# Altium footprint library Capasitor.PcbLib: 20 footprints (part 2 of 2)
Each footprint in its own frame and in the unit in brackets; x right, y up, seen from the top. Pads: shape width x height; smd on the part's side, far side on the other; paste and mask are expansions set on the pad; w line width, h text height; cw(c..) or ccw(c..) is an arc to the next point about the centre after c.
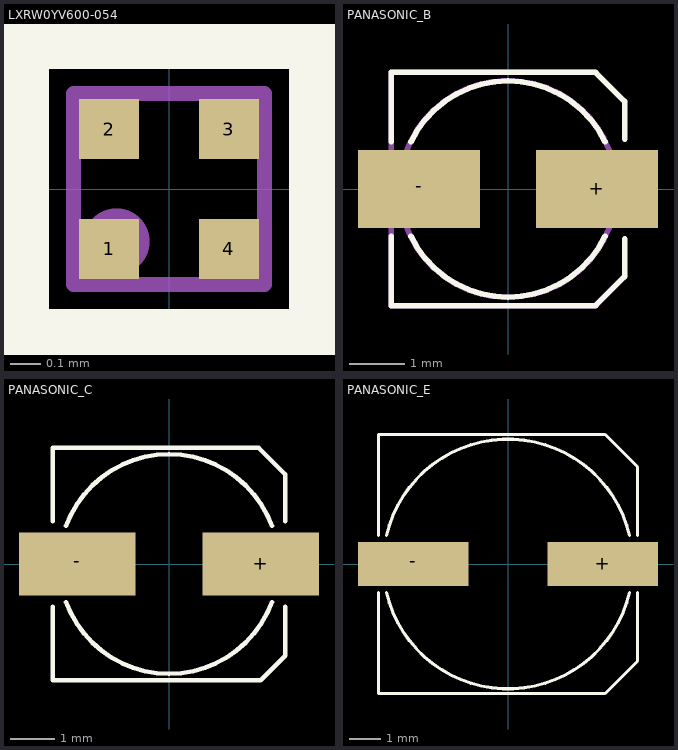
[diagram p1: the footprints below, top view; thin cyan lines are the x and y axes]

## LXRW0YV600-054 [mm]
pads (4):
  rect 0.2x0.2 smd: 1(-0.2,-0.2) 2(-0.2,0.2) 3(0.2,0.2) 4(0.2,-0.2)
Top Overlay:
  lines w0.2: -0.5,-0.5 0.5,-0.5 0.5,0.5 -0.5,0.5 -0.5,-0.5
Top Assembly:
  circle w0.2: c-0.175,-0.175 r0.01
  lines w0.05: -0.318,-0.318 0.318,-0.318 0.318,0.318 -0.318,0.318 -0.318,-0.318
  text ".Designator" at -0.5,0.117 h0.1
3D body "LXRW0_MUR.step": height 0.31, standoff 0, extent -0.318,-0.318 0.318,0.318

## PANASONIC_B [mm]
pads (2):
  rect 2.2x1.4 smd: +(1.6,0) -(-1.6,0)
Top Overlay:
  lines w0.1: 2.1,-1.575 2.1,-0.9 ; 2.1,1.575 2.1,0.9 ; 2.1,-0.9 2.1,-0.9 ; 2.1,0.9 2.1,0.9
  lines w0.102: -2.1,-0.85 -2.1,-2.1 1.575,-2.1 2.1,-1.575 ; -2.1,0.85 -2.1,2.1 1.575,2.1 2.1,1.575 ; -1.75,-0.85 ccw(c0,0) 1.75,-0.85 ; -1.75,0.85 cw(c0,0) 1.75,0.85
Mechanical 3:
  circle w0.102: c0,0 r1.95
  region: -2.3,-0.35 -2.3,0.35 -1.85,0.35 -1.85,-0.35
  region: 1.9,-0.35 1.9,0.35 2.3,0.35 2.3,-0.35
  lines w0.102: 2.1,-1.575 1.575,-2.1 -2.1,-2.1 -2.1,2.1 1.575,2.1 2.1,1.575
3D body "PANASONIC_B.step": height 5.71, standoff 0.01, extent -2.297,-2.15 2.303,2.15

## PANASONIC_C [mm]
pads (2):
  rect 2.6x1.4 smd: +(2.05,0) -(-2.05,0)
Top Overlay:
  lines w0.102: -2.6,-0.95 -2.6,-2.6 2.05,-2.6 2.6,-2.05 2.6,-0.95 ; -2.6,0.95 -2.6,2.6 2,2.6 2.6,2 2.6,0.95 ; -2.3,-0.85 ccw(c0,0) 2.3,-0.85 ; -2.3,0.85 cw(c0,0) 2.3,0.85
3D body "PANASONIC_C.step": height 6.11, standoff 0.01, extent -2.95,-2.65 2.95,2.65

## PANASONIC_E [mm]
pads (2):
  rect 3.5x1.4 smd: +(3,0) -(-3,0)
Top Overlay:
  lines w0.102: -4.1,-0.9 -4.1,-4.1 3.075,-4.1 4.1,-3.075 4.1,-0.9 ; -4.1,0.9 -4.1,4.1 3.075,4.1 4.1,3.075 4.1,0.9 ; -3.85,-0.9 ccw(c0,0) 3.85,-0.9 ; -3.85,0.9 cw(c0,0) 3.85,0.9
3D body "PANASONIC_E.step": height 6.51, standoff 0.01, extent -4.55,-4.15 4.45,4.15